# Altium schematic symbol library CAY16.SchLib: 1 symbol
Pins are listed as number, name and electrical type; pins without a type are passive.

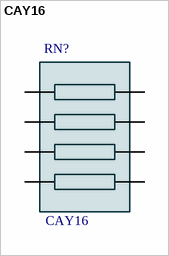
[diagram p0: symbol CAY16]

## CAY16
designator RN?
Res Thick Film Array 47.5K Ohm 1% 0.25W(1/4W) ±200ppm/C ISOL Molded 8-Pin 1206(4 X 0603) Convex SMD T/R; MF: Bourns; MP: CAY16-4752F4LF; Package: None; Price: None; Availability: Unavailable; Value: *
footprint CAY16 (RESCAF80P320X160X60-8N)
pins: 1, 2, 3, 4, 5, 6, 7, 8